# Altium schematic symbol library 7seg.SchLib: 27 symbols
Pins are listed as number, name and electrical type; pins without a type are passive.

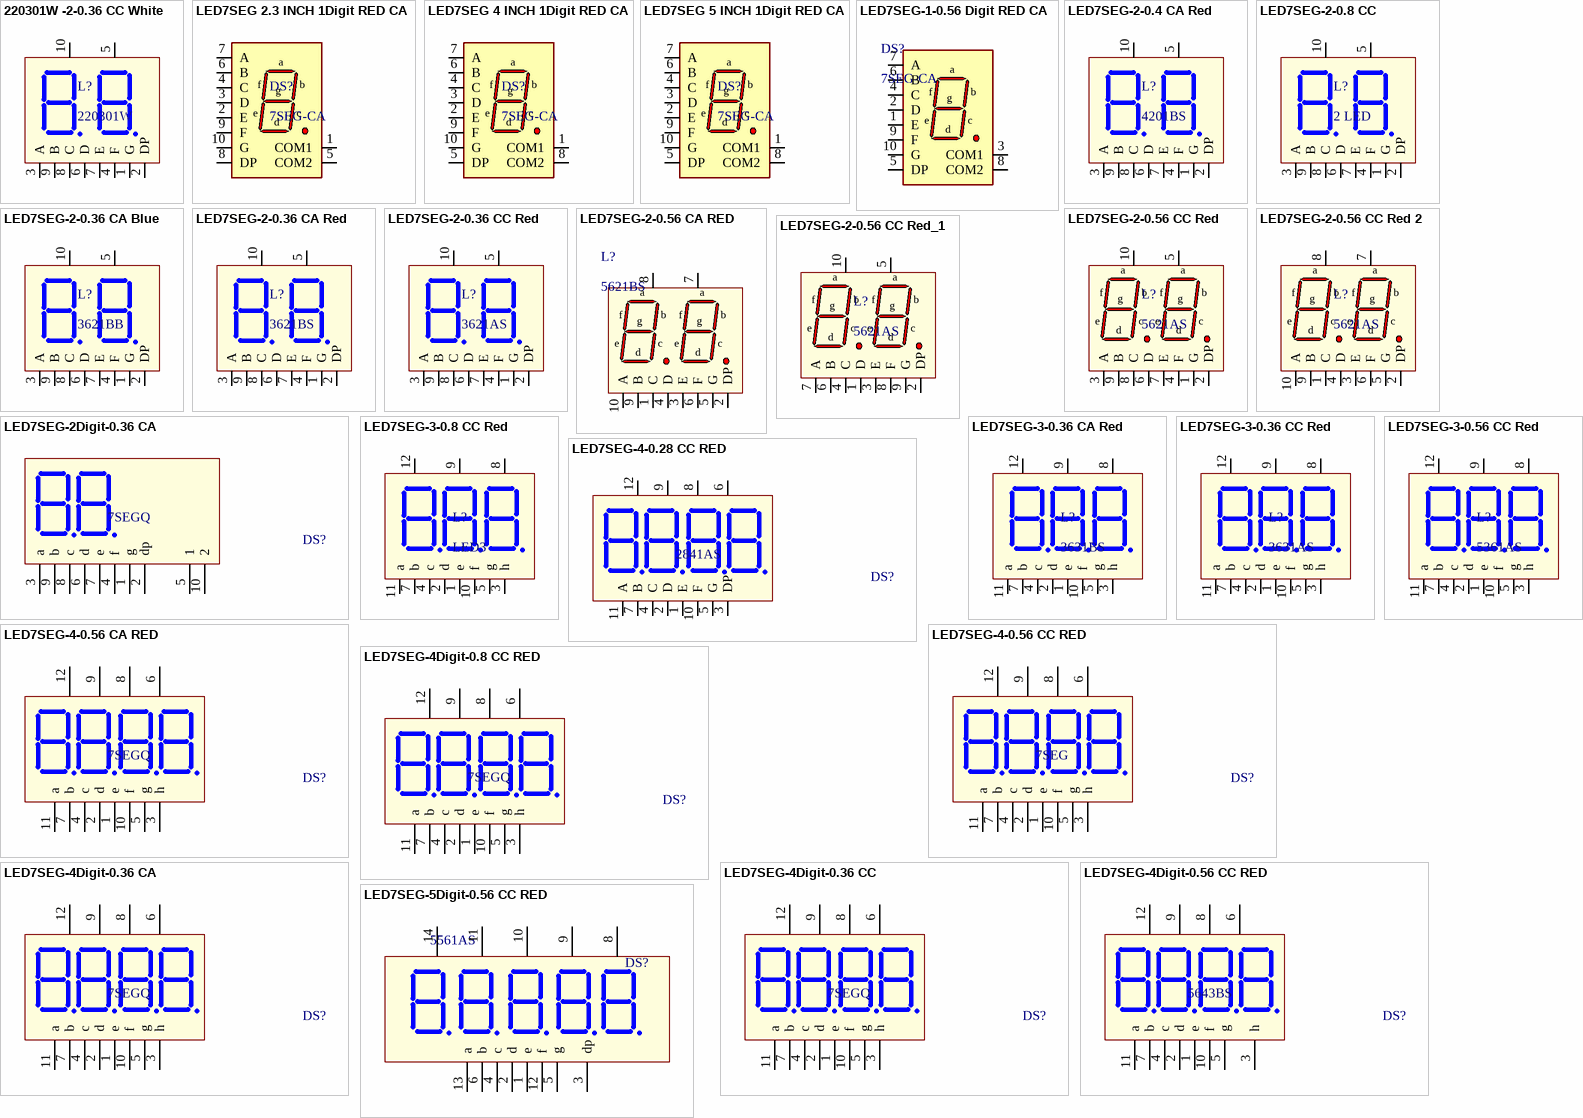
[diagram p0: symbols 220301W -2-0.36 CC White to LED7SEG-5Digit-0.56 CC RED]

## 220301W -2-0.36 CC White
designator L?, comment 220301W
ALS11131.5  220301W / ALS230413  220301W / LED 7 Seg 0.36inch Red CC, Am Chung, Common Cathode; Designed by: TranLuyen; Code: N/A
footprint 3621AS (15 x 14 x 7.2mm)
pins: 1 G, 2 DP, 3 A, 4 F, 5 DIG2, 6 D, 7 E, 8 C, 9 B, 10 DIG1

## LED7SEG 2.3 INCH 1Digit RED CA
designator DS?, comment 7SEG-CA
7SEGMENT, 1DIGIT, common ANODE; Code: 8108-003
footprint LED7SEG-1- 2.3 inch
pins: 1 COM1, 2 E, 3 D, 4 C, 5 COM2, 6 B, 7 A, 8 DP, 9 F, 10 G
text: a; f; g; b; e; c; d

## LED7SEG 4 INCH 1Digit RED CA
designator DS?, comment 7SEG-CA
7SEGMENT, 1DIGIT, common ANODE; Code: 8110-002
footprint LED7SEG-1- 4 inch
pins: 1 COM1, 2 E, 3 D, 4 C, 5 DP, 6 B, 7 A, 8 COM2, 9 F, 10 G
text: a; f; g; b; e; c; d

## LED7SEG 5 INCH 1Digit RED CA
designator DS?, comment 7SEG-CA
7SEGMENT, 1DIGIT, common ANODE; Code: 8111-001
footprint LED7SEG-1- 5 INCH
pins: 1 COM1, 2 E, 3 D, 4 C, 5 DP, 6 B, 7 A, 8 COM2, 9 F, 10 G
text: a; f; g; b; e; c; d

## LED7SEG-1-0.56 Digit RED CA
designator DS?, comment 7SEG-CA
7SEGMENT, 1DIGIT, common ANODE; Code: 8102-016
footprint LED7SEG-1-0.56
pins: 1 E, 2 D, 3 COM1, 4 C, 5 DP, 6 B, 7 A, 8 COM2, 9 F, 10 G
text: a; f; g; b; e; c; d

## LED7SEG-2-0.4 CA Red
designator L?, comment 4201BS
LED 7 Seg 0.4inch Red CA, 4201BS, Duong Chung; Code: 8112-002; Designed by: Nhox
footprint 4201 (size 20.1x16x7mm)
pins: 1 G, 2 DP, 3 A, 4 F, 5 DIG2, 6 D, 7 E, 8 C, 9 B, 10 DIG1

## LED7SEG-2-0.8 CC
designator L?, comment 2 LED
LED 7 Seg 0.8inch Red; Code: N/A
footprint LED7SEG-2-0.8
pins: 1 G, 2 DP, 3 A, 4 F, 5 DIG2, 6 D, 7 E, 8 C, 9 B, 10 DIG1

## LED7SEG-2-0.36 CA Blue
designator L?, comment 3621BB
LED 7 Seg 0.36inch Blue CA, 3621BB, Duong Chung; Designed by: Nhox; Code: N/A
footprint 3621BB (15 x 14 x 7.2mm)
pins: 1 G, 2 DP, 3 A, 4 F, 5 DIG2, 6 D, 7 E, 8 C, 9 B, 10 DIG1

## LED7SEG-2-0.36 CA Red
designator L?, comment 3621BS
LED 7 Seg 0.36inch Red CA, 3621BS, Duong Chung; Code: 8101-009; Designed by: Nhox
footprint 3621BS (15 x 14 x 7.2mm)
pins: 1 G, 2 DP, 3 A, 4 F, 5 DIG2, 6 D, 7 E, 8 C, 9 B, 10 DIG1

## LED7SEG-2-0.36 CC Red
designator L?, comment 3621AS
LED 7 Seg 0.36inch Red CC, 3621AS, Am Chung; Code: 8101-008; Designed by: Nhox
footprint 3621AS (15 x 14 x 7.2mm)
pins: 1 G, 2 DP, 3 A, 4 F, 5 DIG2, 6 D, 7 E, 8 C, 9 B, 10 DIG1

## LED7SEG-2-0.56 CA RED
designator L?, comment 5621BS
LED 7 Seg 0.56inch Red CA; Designed by: TranLuyen; Code: N/A
footprint LED7SEG-2-0.56
pins: 1 C, 2 DP, 3 E, 4 D, 5 G, 6 F, 7 DIG2, 8 DIG1, 9 B, 10 A
text: a; f; g; b; e; c; d

## LED7SEG-2-0.56 CC Red
designator L?, comment 5621AS
LED 7 Seg 0.56inch Red CC, 5621AS, Am Chung; Designed by: Nhox; Code: N/A
footprint LED7SEG-2-0.56
pins: 1 G, 2 DP, 3 A, 4 F, 5 DIG2, 6 D, 7 E, 8 C, 9 B, 10 DIG1
text: a; f; g; b; e; c; d

## LED7SEG-2-0.56 CC Red 2
designator L?, comment 5621AS
LED 7 Seg 0.56inch Red CC, 5621AS, Am Chung; Designed by: Nhox; Code: N/A
footprint LED7SEG-2-0.56
pins: 1 C, 2 DP, 3 E, 4 D, 5 G, 6 F, 7 DIG2, 8 DIG1, 9 B, 10 A
text: a; f; g; b; e; c; d

## LED7SEG-2-0.56 CC Red_1
designator L?, comment 5621AS
LED 7 Seg 0.56inch Red CC, 5621AS, Am Chung, TGIC; Code: N/A; ComponentLink1Description: Link; ComponentLink1URL: https://www.thegioiic.com/5621as-led-7-doan-0-56inch-do-2-so-am-chung
footprint LED7SEG-2-0.56
pins: 1 D, 2 DP, 3 E, 4 C, 5 DIG2, 6 B, 7 A, 8 F, 9 G, 10 DIG1
text: a; f; g; b; e; c; d

## LED7SEG-2Digit-0.36 CA
designator DS?, comment 7SEGQ
7 Seg Dipslay 0.36 inch CA; Code: 8101-009
footprint LED7SEG-2-0.36 (LED, 7-Segment Display, 9.2 mm, Dual Digit; 10 Leads; Row Space 10.7 mm; Pitch 2.54 mm)
pins: 1 g, 2 dp, 3 a, 4 f, 5 1, 6 d, 7 e, 8 c, 9 b, 10 2

## LED7SEG-3-0.8 CC Red
designator L?, comment LED3
LED 7 Seg 0.8inch Red CC; Code: N/A
footprint LED7SEG-3-0.8
pins: 1 e, 2 d, 3 h, 4 c, 5 g, 7 b, 8 V3, 9 V2, 10 f, 11 a, 12 V1

## LED7SEG-3-0.36 CA Red
designator L?, comment 3631BS
3631BS LED 7 Seg 0.36inch Red CA; Code: 8101-007
footprint 3631BS (Size: 22.5 x 14 x 7.2mm)
pins: 1 e, 2 d, 3 h, 4 c, 5 g, 7 b, 8 V3, 9 V2, 10 f, 11 a, 12 V1

## LED7SEG-3-0.36 CC Red
designator L?, comment 3631AS
LED 7 Seg 0.36inch Red CC; Code: 8101-006
footprint 3631AS (Size: 22.5 x 14 x 7.2mm)
pins: 1 e, 2 d, 3 h, 4 c, 5 g, 7 b, 8 V3, 9 V2, 10 f, 11 a, 12 V1

## LED7SEG-3-0.56 CC Red
designator L?, comment 5361AS
LED 7 Seg 0.56 inch Red CC; Code: 8102-009; Designed by: TranLuyen
footprint LED7SEG-3-0.56 (7SEG 3DIGIT 0.56)
pins: 1 e, 2 d, 3 h, 4 c, 5 g, 7 b, 8 V3, 9 V2, 10 f, 11 a, 12 V1

## LED7SEG-4-0.28 CC RED
designator DS?, comment 2841AS
Four 7 Seg Dipslay 0.28 inch common cathode, RED, 2841AS; Designed by: Nhox; Code: N/A
footprint 2841 (32 x10 x 5.8mm)
footprint 2841 Cut Board (32 x10 x 5.8mm)
pins: 1 E, 2 D, 3 DP, 4 C, 5 G, 6 V4, 7 B, 8 V3, 9 V2, 10 F, 11 A, 12 V1

## LED7SEG-4-0.56 CA RED
designator DS?, comment 7SEGQ
Four 7 Seg Dipslay 0.56 inch CA Common Anode; Value: LED 7Q SEG; Code: 8102-014; Designed by: TranLuyen
footprint LED7SEG-4-0.56
footprint LED7SEG-4-0.56 - not HDR
pins: 1 e, 2 d, 3 h, 4 c, 5 g, 6 V4, 7 b, 8 V3, 9 V2, 10 f, 11 a, 12 V1

## LED7SEG-4-0.56 CC RED
designator DS?, comment 7SEG
Four 7 Seg Dipslay 0.56 inch common cathode, RED; Value: LED 7Q SEG; Code: 8102-013; Designed by: TranLuyen
footprint LED7SEG-4-0.56
footprint LED7SEG-4-0.56 - not HDR
pins: 1 e, 2 d, 3 h, 4 c, 5 g, 6 V4, 7 b, 8 V3, 9 V2, 10 f, 11 a, 12 V1

## LED7SEG-4Digit-0.8 CC RED
designator DS?, comment 7SEGQ
Four 7 Seg Dipslay 0.8 inch CC; Value: LED 7Q SEG; Code: N/A
footprint LED7SEG-4-0.8
pins: 1 e, 2 d, 3 h, 4 c, 5 g, 6 V4, 7 b, 8 V3, 9 V2, 10 f, 11 a, 12 V1

## LED7SEG-4Digit-0.36 CA
designator DS?, comment 7SEGQ
Four 7 Seg Dipslay 0.36 inch CA; Value: LED 7Q SEG; Code: 8101-005; Designed by: TranLuyen
footprint LED 7SEG 4x0.36inch (3641BS - 0.36-inch Red 4-Digit CA LED 7-Segment Display)
pins: 1 e, 2 d, 3 h, 4 c, 5 g, 6 V4, 7 b, 8 V3, 9 V2, 10 f, 11 a, 12 V1

## LED7SEG-4Digit-0.36 CC
designator DS?, comment 7SEGQ
Four 7 Seg Dipslay 0.36 inch common cathode; Value: LED 7Q SEG; Code: 8101-004; Designed by: TranLuyen
footprint LED 7SEG 4x0.36inch (3641BS - 0.36-inch Red 4-Digit CA LED 7-Segment Display)
pins: 1 e, 2 d, 3 h, 4 c, 5 g, 6 V4, 7 b, 8 V3, 9 V2, 10 f, 11 a, 12 V1

## LED7SEG-4Digit-0.56 CC RED
designator DS?, comment 5643BS
Four 7 Seg Dipslay 0.56 inch CC; Code: N/A
footprint LED7SEG-4-0.56-5463AS (5463AS)
pins: 1 e, 2 d, 3 h, 4 c, 5 g, 6 V4, 7 b, 8 V3, 9 V2, 10 f, 11 a, 12 V1

## LED7SEG-5Digit-0.56 CC RED
designator DS?, comment 5561AS
Four 7 Seg Dipslay 0.56 inch CC; Code: N/A
footprint LED7SEG-5-0.56-5561AS (5561AS)
pins: 1 e, 2 d, 3 dp, 4 c, 5 g, 6 b, 8 V5, 9 V4, 10 V3, 11 V2, 12 f, 13 a, 14 V1